# Altium schematic symbol library IRF7316.SchLib: 1 symbol
Pins are listed as number, name and electrical type; pins without a type are passive.

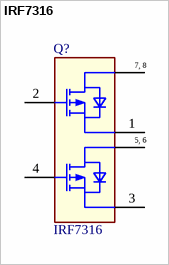
[diagram p0: symbol IRF7316]

## IRF7316
designator Q?
Dual P-Channel HEXFET Power MOSFET, VDSS -55V; Manufacturer: Infineon Technologies; ManufacturerPartNumber: IRF7316; PackageReference: PG-DSO-8-902
footprint SOIC127P600X175-8N-12-V
footprint SOIC127P600X175-8N-12
pins: 1 SOURCE1, 2 GATE1, 3 SOURCE2, 4 GATE2, 5 DRAIN2, 6 DRAIN2, 7 DRAIN1, 8 DRAIN1
text: 7, 8; 5, 6